# Altium schematic symbol library PCB-MIC.SchLib: 4 symbols
Pins are listed as number, name and electrical type; pins without a type are passive.

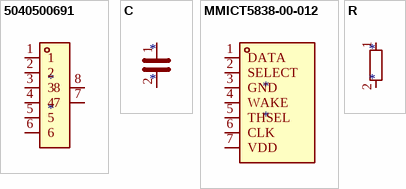
[diagram p0: symbols 5040500691 to R]

## 5040500691
designator *
pins: 1, 2, 3, 4, 5, 6, 7, 8

## C
designator *
pins: 1, 2

## MMICT5838-00-012
designator *
pins: 1 DATA, 2 SELECT, 3 GND, 4 WAKE, 5 THSEL, 6 CLK, 7 VDD

## R
designator *
pins: 1, 2